# Altium footprint library Thunderbolt GPIO.PcbLib: 7 footprints
Each footprint in its own frame and in the unit in brackets; x right, y up, seen from the top. Pads: shape width x height; smd on the part's side, far side on the other; paste and mask are expansions set on the pad; w line width, h text height; cw(c..) or ccw(c..) is an arc to the next point about the centre after c.
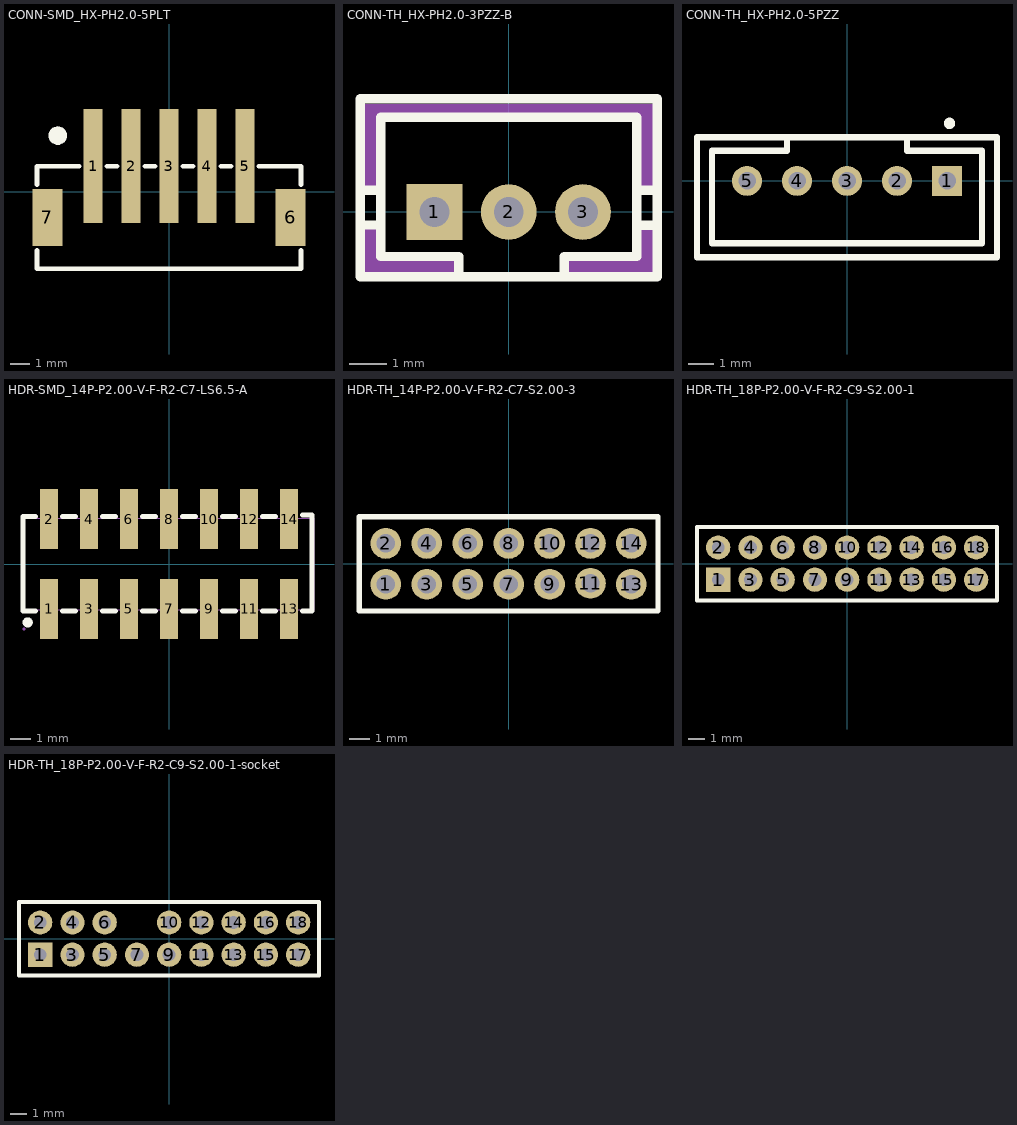
[diagram p0: the footprints below, top view; thin cyan lines are the x and y axes]

## CONN-SMD_HX-PH2.0-5PLT [mm]
pads (7):
  rect 1x6 smd paste+0 mask+0.05: 1(-4,1.35) 2(-2,1.35) 3(0,1.35) 4(2,1.35) 5(4,1.35)
  rect 1.6x3 smd paste+0 mask+0.05: 6(6.4,-1.35) 7(-6.4,-1.35)
Top Overlay:
  region: -6.334,2.964 -6.325,3.058 -6.297,3.148 -6.253,3.231 -6.193,3.304 -6.12,3.364 -6.037,3.409 -5.947,3.436 -5.853,3.445 -5.759,3.436 -5.669,3.409 -5.586,3.364 -5.513,3.304 -5.453,3.231 -5.409,3.148 -5.381,3.058 -5.372,2.964 -5.381,2.87 -5.409,2.78 -5.453,2.697 -5.513,2.624 -5.586,2.564 -5.669,2.52 -5.759,2.492 -5.853,2.483 -5.947,2.492 -6.037,2.52 -6.12,2.564 -6.193,2.624 -6.253,2.697 -6.297,2.78 -6.325,2.87
  lines w0.254: -6.95,-3.081 -6.95,-4.05 4.95,-4.05 6.95,-4.05 6.95,-3.081 ; -6.95,0.381 -6.95,1.35 -4.731,1.35 ; -3.269,1.35 -2.731,1.35 ; -1.269,1.35 -0.731,1.35 ; 0.731,1.35 1.269,1.35 ; 2.731,1.35 3.269,1.35 ; 4.731,1.35 6.95,1.35 6.95,0.381

## CONN-TH_HX-PH2.0-3PZZ-B [mm]
pads (3):
  rect 1.5x1.5 hole 0.8: 1(-2,0)
  round 1.5 hole 0.8: 2(0,0) 3(2,0)
Top Overlay:
  lines w0.254: -3.9,-0.35 -3.45,-0.35 ; -3.9,0.581 -3.45,0.581 ; -1.35,-1.65 -1.35,-1.2 -3.45,-1.2 -3.45,2.55 3.45,2.55 3.45,-1.2 1.5,-1.2 1.5,-1.65 ; 3.45,-0.36 3.9,-0.36 ; 3.45,0.581 3.9,0.581 ; -4,-1.75 4,-1.75 4,3.05 -4,3.05 -4,-1.75
Mechanical 2:
  region: -3.9,0.581 -3.481,0.581 -3.45,0.55 -3.45,2.55 3.45,2.55 3.45,0.55 3.869,0.55 3.9,0.581 3.9,2.9 -3.9,2.9
  region: -3.9,-0.4 -3.9,-1.6 -3.85,-1.65 -1.35,-1.65 -1.35,-1.2 -3.45,-1.2 -3.45,-0.4
  region: 4.023,-0.4 4.023,-1.6 3.973,-1.65 1.473,-1.65 1.473,-1.2 3.573,-1.2 3.573,-0.4
Mechanical 6:
  lines w0.051: -4,-1.75 -4,3.05 4,3.05 4,-1.75 -4,-1.75
Mechanical 8:
  region: -3.939,-1.75 -3.939,-1.775 -3.975,-1.811 -4.025,-1.811 -4.061,-1.775 -4.061,-1.75 -4.061,-1.725 -4.025,-1.689 -3.975,-1.689 -3.939,-1.725 -3.939,-1.75 -3.94,-1.75
Mechanical 9:
  region: -2.25,0.25 -1.75,0.25 -1.75,-0.25 -2.25,-0.25
  region: -0.25,0.25 0.25,0.25 0.25,-0.25 -0.25,-0.25
  region: 1.75,0.25 2.25,0.25 2.25,-0.25 1.75,-0.25

## CONN-TH_HX-PH2.0-5PZZ [mm]
pads (5):
  rect 1.2x1.2 hole 0.7: 1(4,0)
  round 1.2 hole 0.7: 2(2,0) 3(0,0) 4(-2,0)
  round 1.2 hole 0.7 copper offset 0,0: 5(-4,0)
Top Overlay:
  circle w0.254: c4.1,2.3 r0.1
  lines w0.254: -2.4,1.75 -2.4,1.2 -3.999,1.2 -5.4,1.2 -5.4,-2.5 5.4,-2.5 5.4,1.2 3.998,1.2 2.399,1.2 2.399,1.75 ; -6,-3.05 -6,1.75 5.999,1.75 5.999,-3.05 -6,-3.05

## HDR-SMD_14P-P2.00-V-F-R2-C7-LS6.5-A [mm]
pads (14):
  rect 0.89x3 smd: 1(-6,-2.25) 2(-6,2.25) 3(-4,-2.25) 4(-4,2.25) 5(-2,-2.25) 6(-2,2.25) 7(0,-2.25) 8(0,2.25) 9(2,-2.25) 10(2,2.25) 11(4,-2.25) 12(4,2.25) 13(6,-2.25) 14(6,2.25)
Top Overlay:
  circle w0.254: c-7.066,-2.921 r0.127
  lines w0.254: -6.676,-2.36 -7.3,-2.36 -7.3,2.37 -6.676,2.37 ; -5.324,-2.36 -4.676,-2.36 ; -5.324,2.37 -4.676,2.37 ; -3.324,-2.36 -2.676,-2.36 ; -3.324,2.37 -2.676,2.37 ; -1.324,-2.36 -0.676,-2.36 ; -1.324,2.37 -0.676,2.37 ; 0.676,-2.36 1.324,-2.36 ; 0.676,2.37 1.324,2.37 ; 2.676,-2.36 3.324,-2.36 ; 2.676,2.37 3.324,2.37 ; 4.676,-2.36 5.324,-2.36 ; 4.676,2.37 5.324,2.37 ; 6.676,-2.36 7.16,-2.36 7.16,2.45 6.676,2.45
Mechanical 6:
  lines w0.051: -7.25,-2.3 -7.25,2.3 7.25,2.3 7.25,-2.3 -7.25,-2.3
Mechanical 8:
  region: -7.189,-3.25 -7.189,-3.275 -7.225,-3.311 -7.275,-3.311 -7.311,-3.275 -7.311,-3.25 -7.311,-3.225 -7.275,-3.189 -7.225,-3.189 -7.189,-3.225 -7.189,-3.25 -7.19,-3.25
Mechanical 9:
  region: -6.25,-1.65 -5.75,-1.65 -5.75,-3.25 -6.25,-3.25
  region: -6.25,3.25 -5.75,3.25 -5.75,1.65 -6.25,1.65
  region: -4.25,-1.65 -3.75,-1.65 -3.75,-3.25 -4.25,-3.25
  region: -4.25,3.25 -3.75,3.25 -3.75,1.65 -4.25,1.65
  region: -2.25,-1.65 -1.75,-1.65 -1.75,-3.25 -2.25,-3.25
  region: -2.25,3.25 -1.75,3.25 -1.75,1.65 -2.25,1.65
  region: -0.25,-1.65 0.25,-1.65 0.25,-3.25 -0.25,-3.25
  region: -0.25,3.25 0.25,3.25 0.25,1.65 -0.25,1.65
  region: 1.75,-1.65 2.25,-1.65 2.25,-3.25 1.75,-3.25
  region: 1.75,3.25 2.25,3.25 2.25,1.65 1.75,1.65
  region: 3.75,-1.65 4.25,-1.65 4.25,-3.25 3.75,-3.25
  region: 3.75,3.25 4.25,3.25 4.25,1.65 3.75,1.65
  region: 5.75,-1.65 6.25,-1.65 6.25,-3.25 5.75,-3.25
  region: 5.75,3.25 6.25,3.25 6.25,1.65 5.75,1.65

## HDR-TH_14P-P2.00-V-F-R2-C7-S2.00-3 [mm]
pads (14):
  round 1.5 hole 0.9: 1(-6,-1) 2(-6,1) 3(-4,-1) 4(-4,1) 5(-2,-1) 6(-2,1) 7(0,-1) 8(0,1) 9(2,-1) 10(2,1) 11(4,-0.95) 12(4,1) 13(6,-1) 14(6,1)
Top Overlay:
  lines w0.254: 3.298,-2.3 5.25,-2.3 7.3,-2.3 7.3,2.3 5.25,2.3 3.298,2.3 ; 3.298,-2.299 -7.302,-2.298 -7.302,2.301 3.298,2.301
Mechanical 6:
  lines w0.051: -7.3,-2.25 -7.3,2.25 7.3,2.25 7.3,-2.25 -7.3,-2.25
Mechanical 8:
  region: -7.239,-2.25 -7.239,-2.275 -7.275,-2.311 -7.325,-2.311 -7.361,-2.275 -7.361,-2.25 -7.361,-2.225 -7.325,-2.189 -7.275,-2.189 -7.239,-2.225 -7.239,-2.25 -7.24,-2.25
Mechanical 9:
  region: 5.75,1.1 6.25,1.1 6.25,0.9 5.75,0.9
  region: 5.75,-0.9 6.25,-0.9 6.25,-1.1 5.75,-1.1
  region: 3.75,1.1 4.25,1.1 4.25,0.9 3.75,0.9
  region: 3.75,-0.85 4.25,-0.85 4.25,-1.05 3.75,-1.05
  region: -6.25,1.1 -5.75,1.1 -5.75,0.9 -6.25,0.9
  region: -6.25,-0.9 -5.75,-0.9 -5.75,-1.1 -6.25,-1.1
  region: -4.25,1.1 -3.75,1.1 -3.75,0.9 -4.25,0.9
  region: -4.25,-0.9 -3.75,-0.9 -3.75,-1.1 -4.25,-1.1
  region: -2.25,1.1 -1.75,1.1 -1.75,0.9 -2.25,0.9
  region: -2.25,-0.9 -1.75,-0.9 -1.75,-1.1 -2.25,-1.1
  region: -0.25,1.1 0.25,1.1 0.25,0.9 -0.25,0.9
  region: -0.25,-0.9 0.25,-0.9 0.25,-1.1 -0.25,-1.1
  region: 1.75,1.1 2.25,1.1 2.25,0.9 1.75,0.9
  region: 1.75,-0.9 2.25,-0.9 2.25,-1.1 1.75,-1.1

## HDR-TH_18P-P2.00-V-F-R2-C9-S2.00-1 [mm]
pads (18):
  rect 1.5x1.524 hole 0.8: 1(-8,-1)
  round 1.5 hole 0.8: 2(-8,1) 3(-6,-1) 4(-6,1) 5(-4,-1) 6(-4,1) 7(-2,-1) 8(-2,1) 9(0,-1) 10(0,1) 11(2,-1) 12(2,1) 13(4,-1) 14(4,1) 15(6,-1) 16(6,1) 17(8,-1) 18(8,1)
Top Overlay:
  lines w0.254: -9.316,-2.283 9.292,-2.283 9.292,2.261 -9.316,2.261 -9.316,-2.283
Mechanical 6:
  lines w0.051: -9.25,-2.25 -9.25,2.25 9.25,2.25 9.25,-2.25 -9.25,-2.25
Mechanical 8:
  region: -9.189,-2.25 -9.189,-2.275 -9.225,-2.311 -9.275,-2.311 -9.311,-2.275 -9.311,-2.25 -9.311,-2.225 -9.275,-2.189 -9.225,-2.189 -9.189,-2.225 -9.189,-2.25 -9.19,-2.25
Mechanical 9:
  region: -8.25,-0.9 -7.75,-0.9 -7.75,-1.1 -8.25,-1.1
  region: -8.25,1.1 -7.75,1.1 -7.75,0.9 -8.25,0.9
  region: -6.25,-0.9 -5.75,-0.9 -5.75,-1.1 -6.25,-1.1
  region: -6.25,1.1 -5.75,1.1 -5.75,0.9 -6.25,0.9
  region: -4.25,-0.9 -3.75,-0.9 -3.75,-1.1 -4.25,-1.1
  region: -4.25,1.1 -3.75,1.1 -3.75,0.9 -4.25,0.9
  region: -2.25,-0.9 -1.75,-0.9 -1.75,-1.1 -2.25,-1.1
  region: -2.25,1.1 -1.75,1.1 -1.75,0.9 -2.25,0.9
  region: -0.25,-0.9 0.25,-0.9 0.25,-1.1 -0.25,-1.1
  region: -0.25,1.1 0.25,1.1 0.25,0.9 -0.25,0.9
  region: 1.75,-0.9 2.25,-0.9 2.25,-1.1 1.75,-1.1
  region: 1.75,1.1 2.25,1.1 2.25,0.9 1.75,0.9
  region: 3.75,-0.9 4.25,-0.9 4.25,-1.1 3.75,-1.1
  region: 3.75,1.1 4.25,1.1 4.25,0.9 3.75,0.9
  region: 5.75,-0.9 6.25,-0.9 6.25,-1.1 5.75,-1.1
  region: 5.75,1.1 6.25,1.1 6.25,0.9 5.75,0.9
  region: 7.75,-0.9 8.25,-0.9 8.25,-1.1 7.75,-1.1
  region: 7.75,1.1 8.25,1.1 8.25,0.9 7.75,0.9

## HDR-TH_18P-P2.00-V-F-R2-C9-S2.00-1-socket [mm]
pads (17):
  rect 1.5x1.524 hole 0.8: 1(-8,-1)
  round 1.5 hole 0.8: 2(-8,1) 3(-6,-1) 4(-6,1) 5(-4,-1) 6(-4,1) 7(-2,-1) 9(0,-1) 10(0,1) 11(2,-1) 12(2,1) 13(4,-1) 14(4,1) 15(6,-1) 16(6,1) 17(8,-1) 18(8,1)
Top Overlay:
  lines w0.254: -9.316,-2.283 9.292,-2.283 9.292,2.261 -9.316,2.261 -9.316,-2.283
Mechanical 6:
  lines w0.051: -9.25,-2.25 -9.25,2.25 9.25,2.25 9.25,-2.25 -9.25,-2.25
Mechanical 8:
  region: -9.189,-2.25 -9.189,-2.275 -9.225,-2.311 -9.275,-2.311 -9.311,-2.275 -9.311,-2.25 -9.311,-2.225 -9.275,-2.189 -9.225,-2.189 -9.189,-2.225 -9.189,-2.25 -9.19,-2.25
Mechanical 9:
  region: -8.25,-0.9 -7.75,-0.9 -7.75,-1.1 -8.25,-1.1
  region: -8.25,1.1 -7.75,1.1 -7.75,0.9 -8.25,0.9
  region: -6.25,-0.9 -5.75,-0.9 -5.75,-1.1 -6.25,-1.1
  region: -6.25,1.1 -5.75,1.1 -5.75,0.9 -6.25,0.9
  region: -4.25,-0.9 -3.75,-0.9 -3.75,-1.1 -4.25,-1.1
  region: -4.25,1.1 -3.75,1.1 -3.75,0.9 -4.25,0.9
  region: -2.25,-0.9 -1.75,-0.9 -1.75,-1.1 -2.25,-1.1
  region: -0.25,-0.9 0.25,-0.9 0.25,-1.1 -0.25,-1.1
  region: -0.25,1.1 0.25,1.1 0.25,0.9 -0.25,0.9
  region: 1.75,-0.9 2.25,-0.9 2.25,-1.1 1.75,-1.1
  region: 1.75,1.1 2.25,1.1 2.25,0.9 1.75,0.9
  region: 3.75,-0.9 4.25,-0.9 4.25,-1.1 3.75,-1.1
  region: 3.75,1.1 4.25,1.1 4.25,0.9 3.75,0.9
  region: 5.75,-0.9 6.25,-0.9 6.25,-1.1 5.75,-1.1
  region: 5.75,1.1 6.25,1.1 6.25,0.9 5.75,0.9
  region: 7.75,-0.9 8.25,-0.9 8.25,-1.1 7.75,-1.1
  region: 7.75,1.1 8.25,1.1 8.25,0.9 7.75,0.9